# Altium schematic symbol library ESD122U1W0201E6327XTSA1.SchLib: 1 symbol
Pins are listed as number, name and electrical type; pins without a type are passive.

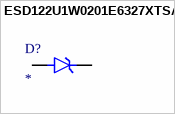
[diagram p0: symbol ESD122U1W0201E6327XTSA1]

## ESD122U1W0201E6327XTSA1
designator D?
1.85V (Typ) Clamp 2.5A (8/20µs) Ipp Tvs Diode Surface Mount SG-WLL-2-2; MP: RNCF0201DTE100R; Package: None; Price: None; Value: *; Availability: Unavailable
footprint RESC0502X28N
footprint RESC0502X28N
pins: A, C